# Altium footprint library amirlib.PcbLib: 456 footprints (part 12 of 29)
Each footprint in its own frame and in the unit in brackets; x right, y up, seen from the top. Pads: shape width x height; smd on the part's side, far side on the other; paste and mask are expansions set on the pad; w line width, h text height; cw(c..) or ccw(c..) is an arc to the next point about the centre after c.
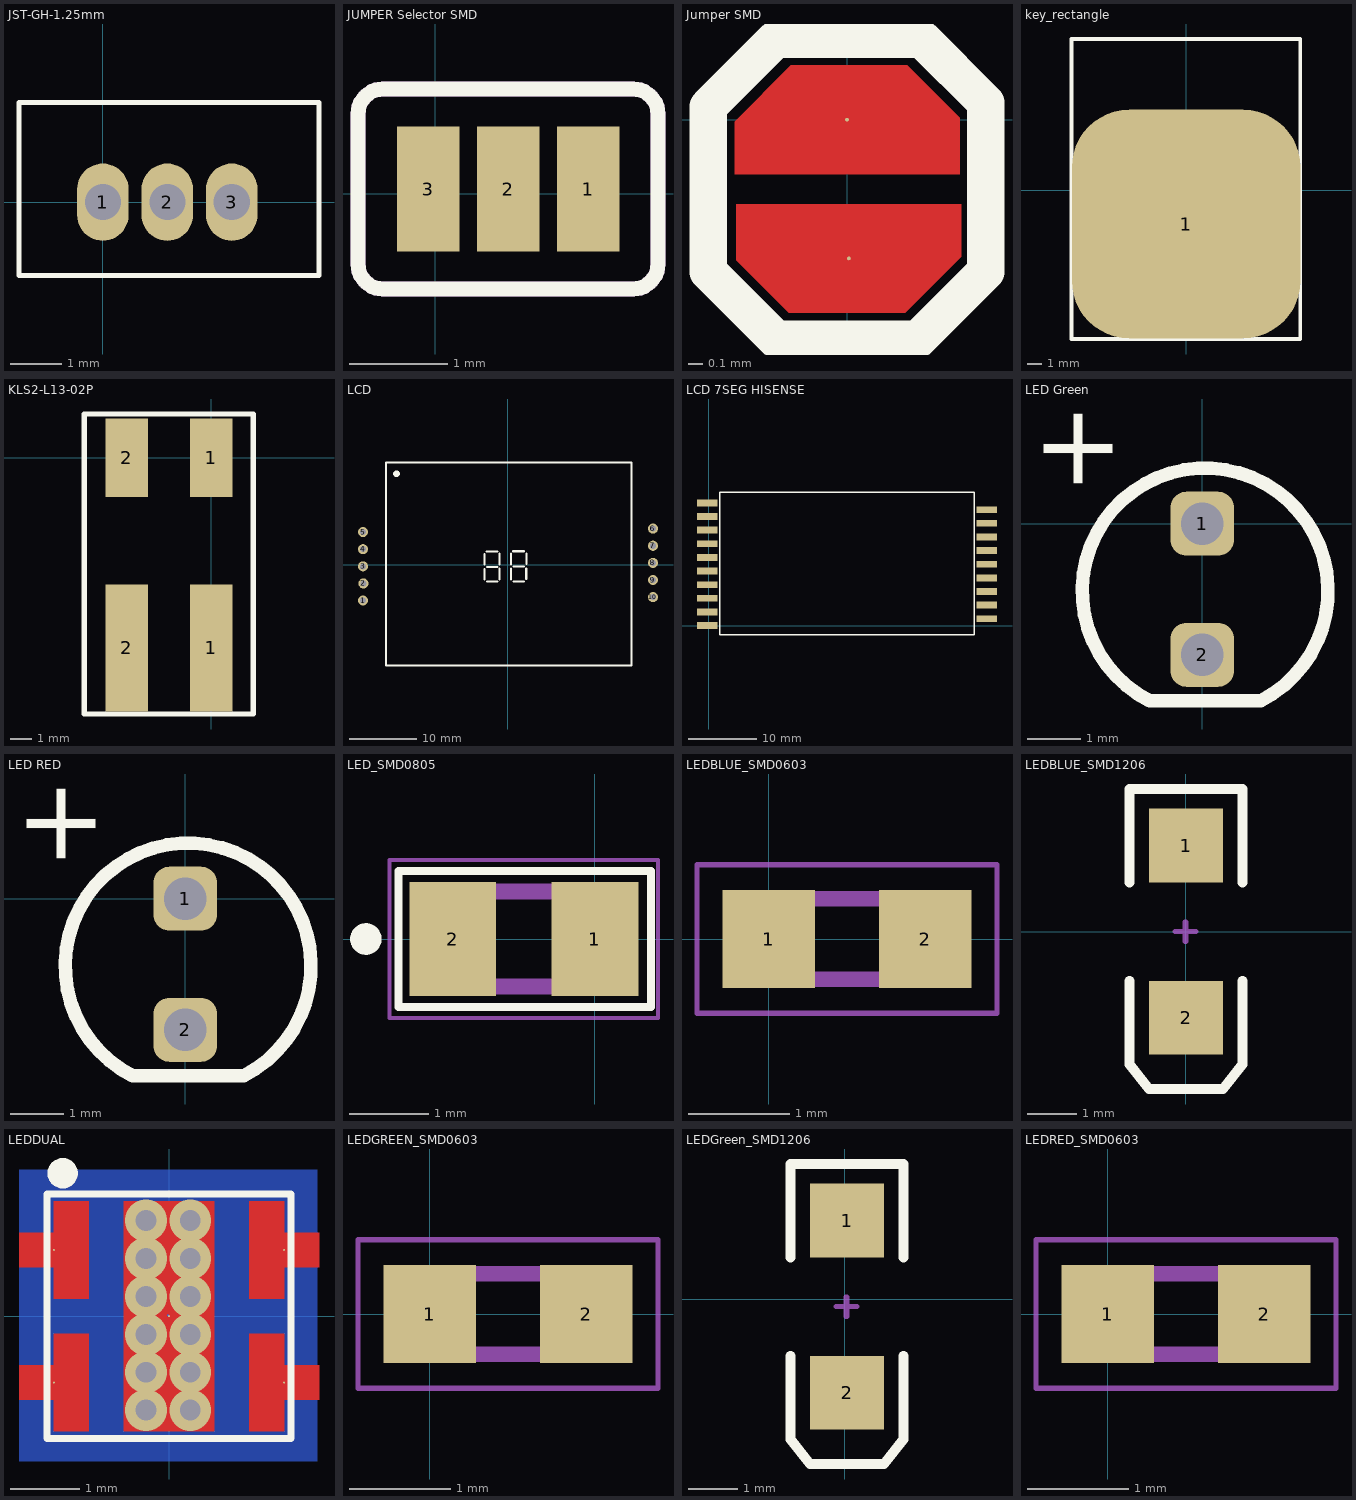
[diagram p11: the footprints below, top view; thin cyan lines are the x and y axes]

## JST-GH-1.25mm [mm]
pads (3):
  oval 1x1.5 hole 0.7: 1(0,0) 2(1.25,0) 3(2.5,0)
Top Overlay:
  lines w0.1: -1.626,-1.422 4.191,-1.422 4.191,1.93 -1.626,1.93 -1.626,-1.422
3D body "JST - GH - Thru (V) - 3Pin - 1.25mm.stp": height 4.22, standoff -2.26, extent -1.62,-1.397 4.12,1.93

## JUMPER Selector SMD [mm]
pads (3):
  rect 0.635x1.27 smd paste+0: 1(1.554,0.05) 2(0.741,0.05) 3(-0.072,0.05)
Top Overlay:
  lines w0.152: -0.783,-0.712 ccw(c-0.529,-0.712) -0.529,-0.966 2.011,-0.966 ccw(c2.011,-0.712) 2.265,-0.712 2.265,0.812 ccw(c2.011,0.812) 2.011,1.066 -0.529,1.066 ccw(c-0.529,0.812) -0.783,0.812 -0.783,-0.712
Mechanical 7:
  lines w0.152: -0.783,-0.712 ccw(c-0.529,-0.712) -0.529,-0.966 2.011,-0.966 ccw(c2.011,-0.712) 2.265,-0.712 2.265,0.812 ccw(c2.011,0.812) 2.011,1.066 -0.529,1.066 ccw(c-0.529,0.812) -0.783,0.812 -0.783,-0.712

## Jumper SMD [mil]
pads (2):
  round 1 smd: 1(0,0) 2(0.5,-37)
Top Layer:
  region: -15.5,-51.5 -29.5,-37.5 -29.5,-22.5 30.5,-22.5 30.5,-36.5 15.5,-51.5
  region: 16,14.5 30,0.5 30,-14.5 -30,-14.5 -30,-0.5 -15,14.5
Top Overlay:
  lines w10: -37,-40.5 -37,3.5 -19,21.5 20,21.5 37,4.5 37,3.5 37,-35.5 37,-40.5 19,-58.5 -19,-58.5 -37,-40.5

## key_rectangle [mm]
pads (1):
  rrect50% 16x16 smd: 1(0,-2.375)
Top Overlay:
  lines w0.254: 7.975,-10.425 7.975,-10.425 ; 7.975,-10.425 7.975,10.575 -8.025,10.575 -8.025,-10.425 7.975,-10.425

## KLS2-L13-02P [mm]
pads (4):
  rect 2x6 smd: 1(0,-9.003) 2(-4,-9.003)
  rect 2x3.7 smd: 1(0,0) 2(-4,0)
Top Overlay:
  lines w0.254: -6.016,-12.129 1.984,-12.129 1.984,2.071 -6.016,2.071 -6.016,-12.129
3D body "KLS2-L13-02P.stp": height 4.7, standoff 0.1, extent -5.941,-11.361 1.959,1.784

## LCD [mm]
pads (10):
  round 1.5 hole 0.9: 1(-21.487,-5.334) 2(-21.437,-2.794) 3(-21.487,-0.254) 4(-21.487,2.286) 5(-21.487,4.826) 6(21.513,5.334) 7(21.513,2.794) 8(21.513,0.254) 9(21.513,-2.286) 10(21.513,-4.826)
Top Overlay:
  lines w0.3: -3.492,-2.235 -3.492,-0.635 ; -3.479,0 -3.479,1.6 ; -3.174,1.93 -1.574,1.93 ; -3.136,-2.54 -1.536,-2.54 ; -3.136,-0.33 -1.536,-0.33 ; -1.231,-2.21 -1.231,-0.61 ; -1.218,0.025 -1.218,1.625 ; 0.458,-2.184 0.458,-0.584 ; 0.471,0.051 0.471,1.651 ; 0.776,1.981 2.376,1.981 ; 0.814,-2.489 2.414,-2.489 ; 0.814,-0.279 2.414,-0.279 ; 2.719,-2.159 2.719,-0.559 ; 2.731,0.076 2.731,1.676 ; 18.316,15.113 -18.084,15.113 -18.084,-14.935 18.342,-14.935 18.342,15.113
  lines w1: -16.534,13.487 -16.509,13.462

## LCD 7SEG HISENSE [mm]
pads (19):
  rect 3x1 smd: 1(40.8,1) 2(40.8,3) 3(40.8,5) 4(40.8,7) 5(40.8,9) 6(40.8,11) 7(40.8,13) 8(40.8,15) 9(40.8,17) 10(-0.2,0) 11(-0.2,2) 12(-0.2,4) 13(-0.2,6) 14(-0.2,8) 15(-0.2,10) 16(-0.2,12) 17(-0.2,14) 18(-0.2,16) 19(-0.2,18)
Top Overlay:
  lines w0.2: 1.636,-1.336 38.974,-1.336 38.974,19.569 1.636,19.569 1.636,-1.336

## LED Green [mm]
pads (2):
  rrect50% 1.2x1.2 / inner rrect50% 2.2x1.3 / far side rrect50% 2.2x1.3 hole 0.8: 1(0,0) 2(0,-2.464)
Top Overlay:
  lines w0.254: 1.099,-3.328 -0.984,-3.328 cw(c0.054,-1.266) 1.099,-3.324
  text "+" at -2.972,0.533 h1.52
3D body "everlight-3MM-LED-GREEN.STEP": height 5.64, standoff -1.16, extent -1.846,-2.792 1.954,0.634

## LED RED [mm]
pads (2):
  rrect50% 1.2x1.2 / inner rrect50% 2.2x1.3 / far side rrect50% 2.2x1.3 hole 0.8: 1(0,0) 2(0,-2.464)
Top Overlay:
  lines w0.254: 1.099,-3.328 -0.984,-3.328 cw(c0.054,-1.266) 1.099,-3.324
  text "+" at -2.972,0.533 h1.52
3D body "CircuitWorks-LED DIP 3MM.STEP": height 6.5, standoff -0.6, extent -1.844,-2.817 1.956,0.683

## LED_SMD0805 [mm]
pads (2):
  rect 1.1x1.45 smd: 1(0,0) 2(-1.8,0)
Top Overlay:
  circle w0.2: c-2.9,0 r0.1
  lines w0.1: -2.489,-0.864 0.711,-0.864 0.711,0.864 -2.489,0.864 -2.489,-0.864
Mechanical 13:
  region: -1.4,-0.6 -1.9,-0.6 -1.9,0.6 -1.4,0.6
  region: 0.1,-0.6 -0.4,-0.6 -0.4,0.6 0.1,0.6
  lines w0.2: -1.9,-0.6 0.1,-0.6 0.1,0.6 -1.9,0.6 -1.9,-0.6
Mechanical 15:
  lines w0.05: -2.6,-1 0.8,-1 0.8,1 -2.6,1 -2.6,-1
3D body "step_temp.STEP": height 0.9, standoff 0, extent -1.9,-0.65 0.1,0.65

## LEDBLUE_SMD0603 [mm]
pads (2):
  rect 0.92x0.97 smd: 1(0,0) 2(1.55,0)
Mechanical 13:
  lines w0.152: -0.025,-0.4 -0.025,0.4 1.575,0.4 1.575,-0.4 -0.025,-0.4
Mechanical 15:
  lines w0.05: -0.71,-0.735 2.26,-0.735 2.26,0.735 -0.71,0.735 -0.71,-0.735
3D body "User Library-LED_0603_B.STEP": height 0.6, standoff 0, extent -0.063,-0.4 1.537,0.4

## LEDBLUE_SMD1206 [mm]
pads (2):
  rect 1.5x1.5 smd: 1(0,1.75) 2(0,-1.75)
Top Overlay:
  lines w0.2: -1.15,-1 -1.15,-2.7 -0.75,-3.2 0.75,-3.2 1.15,-2.7 1.15,-1 ; -1.15,1 -1.15,2.9 1.15,2.9 1.15,1
Mechanical 1:
  lines w0.1: -0.225,0 0.175,0 ; -0.2,0 0.2,0 ; -0.025,-0.2 -0.025,0.2 ; 0,-0.2 0,0.2
3D body "User Library-led_1206.STEP": height 1.1, standoff 0, extent -0.8,-1.61 0.8,1.61

## LEDDUAL [mil]
pads (6):
  round 1 smd: 1(-64.96,37.4) 2(64.96,37.4) 3(-64.96,-37.4) 4(64.96,-37.4) 5(0,0)
  round 1 smd far side: 5(-0.49,0.49)
via -13,32.6 diameter 23.62 hole 11.81
via 12,32.6 diameter 23.62 hole 11.81
via 12,11.2 diameter 23.62 hole 11.81
via -13,11.2 diameter 23.62 hole 11.81
via -13,-10.2 diameter 23.62 hole 11.81
via 12,-10.2 diameter 23.62 hole 11.81
via 12,-31.6 diameter 23.62 hole 11.81
via -13,-31.6 diameter 23.62 hole 11.81
via -13,-53 diameter 23.62 hole 11.81
via 12,-53 diameter 23.62 hole 11.81
via -13,54 diameter 23.62 hole 11.81
via 12,54 diameter 23.62 hole 11.81
Top Layer:
  region: 25.59,-64.96 -25.59,-64.96 -25.59,64.96 25.59,64.96
  region: 64.96,-64.96 45.28,-64.96 45.28,-9.84 64.96,-9.84 64.96,-27.56 84.65,-27.56 84.65,-47.24 64.96,-47.24
  region: 45.28,64.96 45.28,9.84 64.96,9.84 64.96,27.56 84.65,27.56 84.65,47.24 64.96,47.24 64.96,64.96
  region: -45.28,-64.96 -45.28,-9.84 -64.96,-9.84 -64.96,-27.56 -84.65,-27.56 -84.65,-47.24 -64.96,-47.24 -64.96,-64.96
  region: -64.96,9.84 -45.28,9.84 -45.28,64.96 -64.96,64.96 -64.96,47.24 -84.65,47.24 -84.65,27.56 -64.96,27.56
Bottom Layer:
  region: -84.65,82.68 83.66,82.68 83.66,-81.69 -84.65,-81.69
Top Overlay:
  circle w10: c-60.04,80.71 r3.55
  lines w3.94: -68.9,-68.9 -68.9,68.9 68.9,68.9 68.9,-68.9 -68.9,-68.9

## LEDGREEN_SMD0603 [mm]
pads (2):
  rect 0.92x0.97 smd: 1(0,0) 2(1.55,0)
Mechanical 13:
  lines w0.152: -0.025,-0.4 -0.025,0.4 1.575,0.4 1.575,-0.4 -0.025,-0.4
Mechanical 15:
  lines w0.05: -0.71,-0.735 2.26,-0.735 2.26,0.735 -0.71,0.735 -0.71,-0.735
3D body "User Library-LED_0603_G.STEP": height 0.6, standoff 0, extent 0.013,-0.375 1.613,0.425

## LEDGreen_SMD1206 [mm]
pads (2):
  rect 1.5x1.5 smd: 1(0.048,1.6) 2(0.048,-1.9)
Top Overlay:
  lines w0.2: -1.102,-1.15 -1.102,-2.85 -0.702,-3.35 0.798,-3.35 1.198,-2.85 1.198,-1.15 ; -1.102,0.85 -1.102,2.75 1.198,2.75 1.198,0.85
Mechanical 1:
  lines w0.1: -0.177,-0.15 0.223,-0.15 ; -0.152,-0.15 0.248,-0.15 ; 0.023,-0.35 0.023,0.05 ; 0.048,-0.35 0.048,0.05
3D body "CircuitWorks-LED 1206.STEP": height 1.1, standoff 0, extent -0.749,-1.651 0.851,1.549

## LEDRED_SMD0603 [mm]
pads (2):
  rect 0.92x0.97 smd: 1(0,0) 2(1.55,0)
Mechanical 13:
  lines w0.152: -0.025,-0.4 1.575,-0.4 1.575,0.4 -0.025,0.4 -0.025,-0.4
Mechanical 15:
  lines w0.05: -0.71,-0.735 -0.71,0.735 2.26,0.735 2.26,-0.735 -0.71,-0.735
3D body "User Library-LED_0603_R.STEP": height 0.6, standoff 0, extent -0.013,-0.425 1.587,0.375